# Altium footprint library FootPrintLib_1.PcbLib: 498 footprints (part 18 of 35)
Each footprint in its own frame and in the unit in brackets; x right, y up, seen from the top. Pads: shape width x height; smd on the part's side, far side on the other; paste and mask are expansions set on the pad; w line width, h text height; cw(c..) or ccw(c..) is an arc to the next point about the centre after c.
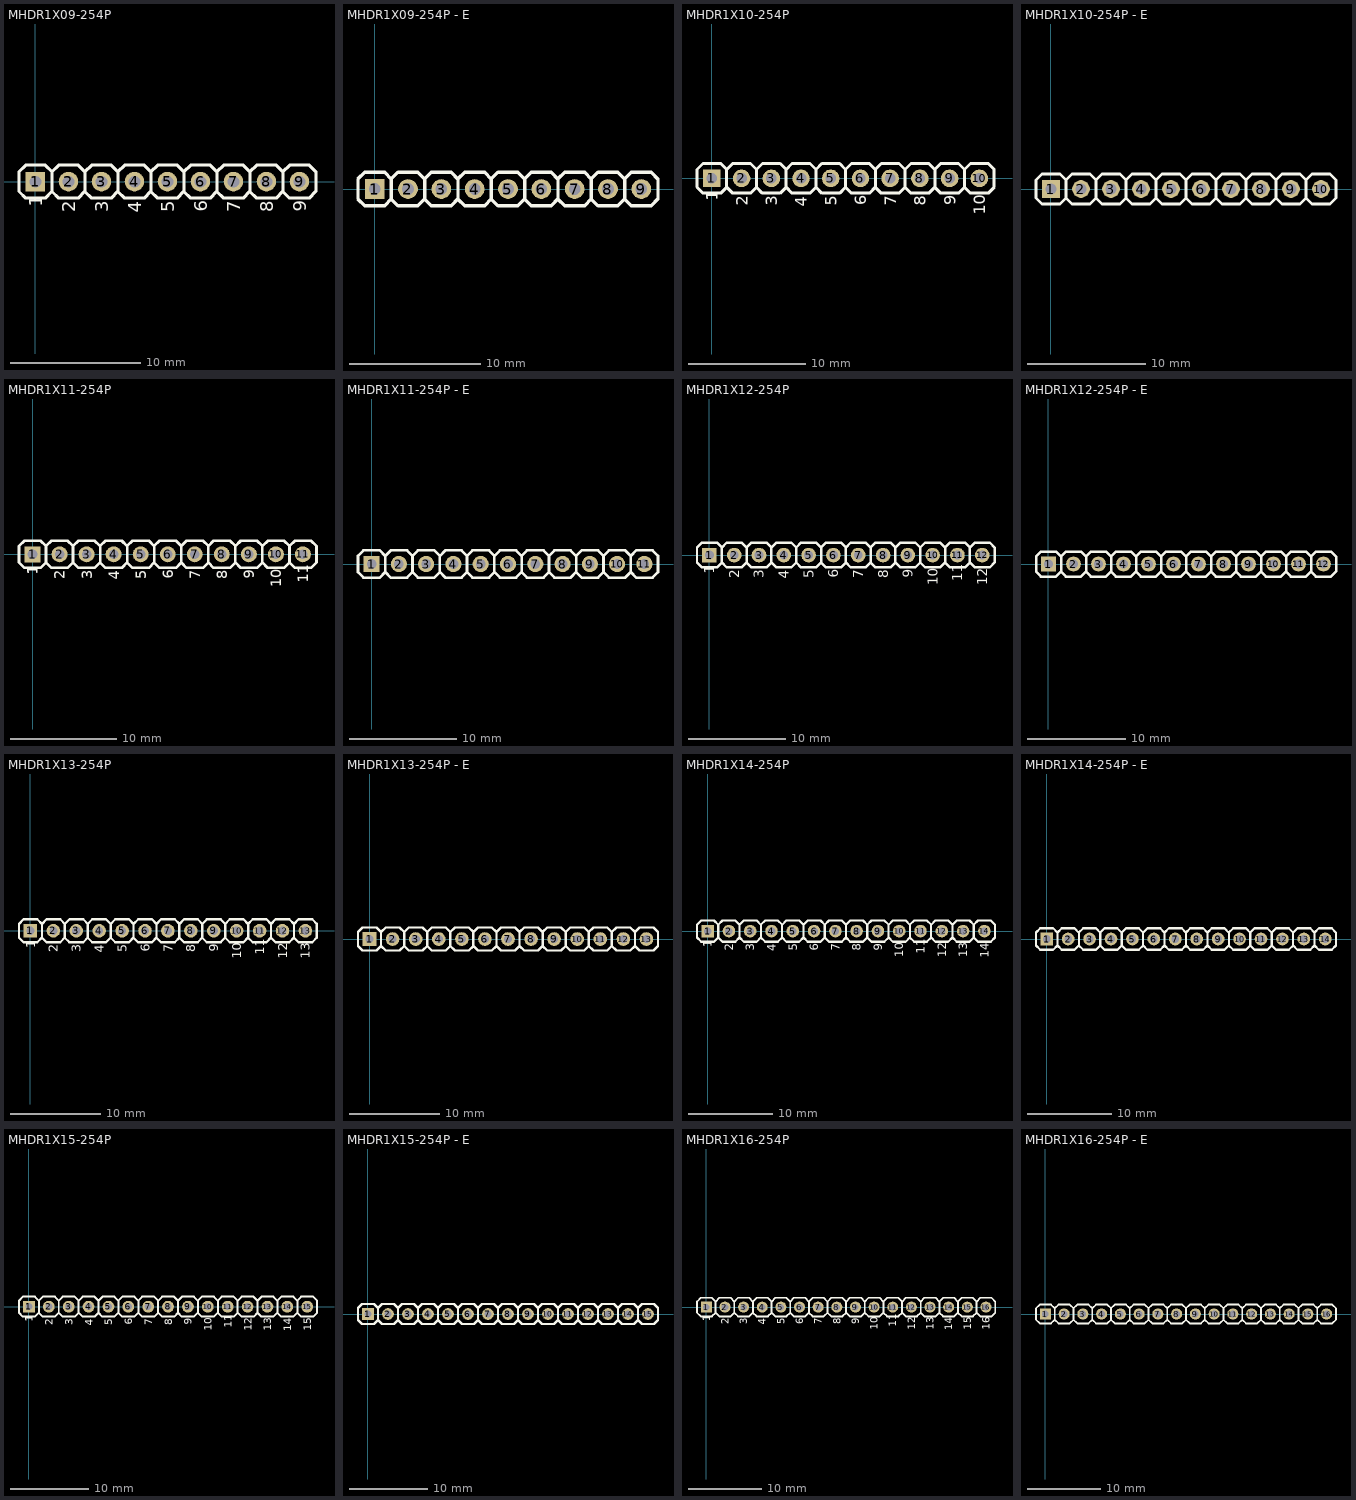
[diagram p17: the footprints below, top view; thin cyan lines are the x and y axes]

## MHDR1X09-254P [mm] "Male Header 1X09 with 2.54 mm Pitch"
height 8.4
pads (9):
  rect 1.5x1.5 hole 0.9: 1(0,0)
  round 1.5 hole 0.9: 2(2.54,0) 3(5.08,0) 4(7.62,0) 5(10.16,0) 6(12.7,0) 7(15.24,0) 8(17.78,0) 9(20.32,0)
Top Overlay:
  lines w0.254: 1.27,-0.762 1.777,-1.268 3.302,-1.268 3.81,-0.76 3.81,0.762 3.301,1.272 1.778,1.272 1.27,0.764 ; 3.81,-0.762 4.317,-1.268 5.842,-1.268 6.35,-0.76 6.35,0.762 5.841,1.272 4.318,1.272 3.81,0.764 ; 6.35,-0.762 6.857,-1.268 8.382,-1.268 8.89,-0.76 8.89,0.762 8.381,1.272 6.858,1.272 6.35,0.764 ; 8.89,-0.762 9.397,-1.268 10.922,-1.268 11.43,-0.76 11.43,0.762 10.921,1.272 9.398,1.272 8.89,0.764 ; 11.43,-0.762 11.937,-1.268 13.462,-1.268 13.97,-0.76 13.97,0.762 13.461,1.272 11.938,1.272 11.43,0.764 ; 13.97,-0.762 14.477,-1.268 16.002,-1.268 16.51,-0.76 16.51,0.762 16.001,1.272 14.478,1.272 13.97,0.764 ; 16.51,-0.762 17.017,-1.268 18.542,-1.268 19.05,-0.76 19.05,0.762 18.541,1.272 17.018,1.272 16.51,0.764 ; 19.05,-0.762 19.557,-1.268 21.082,-1.268 21.59,-0.76 21.59,0.762 21.081,1.272 19.558,1.272 19.05,0.764 ; -1.27,-0.762 -0.763,-1.268 0.762,-1.268 1.27,-0.76 1.27,0.762 0.761,1.272 -0.762,1.272 -1.27,0.764 -1.27,-0.762
  text "9" at 20.828,-2.317 h1
  text "8" at 18.288,-2.364 h1
  text "7" at 15.748,-2.364 h1
  text "6" at 13.208,-2.317 h1
  text "5" at 10.668,-2.364 h1
  text "4" at 8.128,-2.412 h1
  text "3" at 5.588,-2.364 h1
  text "2" at 3.048,-2.364 h1
  text "1" at 0.508,-1.936 h1
  text "1" at 0.508,-1.936 h1
3D body "PIN.STEP": height 8.43, standoff -2.49, extent -1.27,-1.27 1.27,1.27
3D body "PIN_mid.STEP": height 8.43, standoff -2.49, extent 1.27,-1.27 3.81,1.27
3D body "PIN_mid.STEP": height 8.43, standoff -2.49, extent 3.81,-1.27 6.35,1.27
3D body "PIN_mid.STEP": height 8.43, standoff -2.49, extent 6.35,-1.27 8.89,1.27
3D body "PIN_mid.STEP": height 8.43, standoff -2.49, extent 8.89,-1.27 11.43,1.27
3D body "PIN_mid.STEP": height 8.43, standoff -2.49, extent 11.43,-1.27 13.97,1.27
3D body "PIN_mid.STEP": height 8.43, standoff -2.49, extent 13.97,-1.27 16.51,1.27
3D body "PIN_mid.STEP": height 8.43, standoff -2.49, extent 16.51,-1.27 19.05,1.27
3D body "PIN.STEP": height 8.43, standoff -2.49, extent 19.05,-1.27 21.59,1.27

## MHDR1X09-254P - E [mm] "Male Header 1X09 with 2.54 mm Pitch"
height 8.4
pads (9):
  rect 1.5x1.5 hole 0.9: 1(0,0)
  round 1.5 hole 0.9: 2(2.54,0) 3(5.08,0) 4(7.62,0) 5(10.16,0) 6(12.7,0) 7(15.24,0) 8(17.78,0) 9(20.32,0)
Top Overlay:
  lines w0.254: 1.27,-0.762 1.777,-1.268 3.302,-1.268 3.81,-0.76 3.81,0.762 3.301,1.272 1.778,1.272 1.27,0.764 ; 3.81,-0.762 4.317,-1.268 5.842,-1.268 6.35,-0.76 6.35,0.762 5.841,1.272 4.318,1.272 3.81,0.764 ; 6.35,-0.762 6.857,-1.268 8.382,-1.268 8.89,-0.76 8.89,0.762 8.381,1.272 6.858,1.272 6.35,0.764 ; 8.89,-0.762 9.397,-1.268 10.922,-1.268 11.43,-0.76 11.43,0.762 10.921,1.272 9.398,1.272 8.89,0.764 ; 11.43,-0.762 11.937,-1.268 13.462,-1.268 13.97,-0.76 13.97,0.762 13.461,1.272 11.938,1.272 11.43,0.764 ; 13.97,-0.762 14.477,-1.268 16.002,-1.268 16.51,-0.76 16.51,0.762 16.001,1.272 14.478,1.272 13.97,0.764 ; 16.51,-0.762 17.017,-1.268 18.542,-1.268 19.05,-0.76 19.05,0.762 18.541,1.272 17.018,1.272 16.51,0.764 ; 19.05,-0.762 19.557,-1.268 21.082,-1.268 21.59,-0.76 21.59,0.762 21.081,1.272 19.558,1.272 19.05,0.764 ; -1.27,-0.762 -1.27,0.764 -0.762,1.272 0.761,1.272 1.27,0.762 1.27,-0.76 0.762,-1.268 -0.763,-1.268 -1.27,-0.762
3D body "PIN.STEP": height 8.43, standoff -2.49, extent 19.05,-1.27 21.59,1.27
3D body "PIN_mid.STEP": height 8.43, standoff -2.49, extent 16.51,-1.27 19.05,1.27
3D body "PIN_mid.STEP": height 8.43, standoff -2.49, extent 13.97,-1.27 16.51,1.27
3D body "PIN_mid.STEP": height 8.43, standoff -2.49, extent 11.43,-1.27 13.97,1.27
3D body "PIN_mid.STEP": height 8.43, standoff -2.49, extent 8.89,-1.27 11.43,1.27
3D body "PIN_mid.STEP": height 8.43, standoff -2.49, extent 6.35,-1.27 8.89,1.27
3D body "PIN_mid.STEP": height 8.43, standoff -2.49, extent 3.81,-1.27 6.35,1.27
3D body "PIN_mid.STEP": height 8.43, standoff -2.49, extent 1.27,-1.27 3.81,1.27
3D body "PIN.STEP": height 8.43, standoff -2.49, extent -1.27,-1.27 1.27,1.27

## MHDR1X10-254P [mm] "Male Header 1X10 with 2.54 mm Pitch"
height 8.4
pads (10):
  rect 1.5x1.5 hole 0.9: 1(0,0)
  round 1.5 hole 0.9: 2(2.54,0) 3(5.08,0) 4(7.62,0) 5(10.16,0) 6(12.7,0) 7(15.24,0) 8(17.78,0) 9(20.32,0) 10(22.86,0)
Top Overlay:
  lines w0.254: 1.27,-0.762 1.777,-1.268 3.302,-1.268 3.81,-0.76 3.81,0.762 3.301,1.272 1.778,1.272 1.27,0.764 ; 3.81,-0.762 4.317,-1.268 5.842,-1.268 6.35,-0.76 6.35,0.762 5.841,1.272 4.318,1.272 3.81,0.764 ; 6.35,-0.762 6.857,-1.268 8.382,-1.268 8.89,-0.76 8.89,0.762 8.381,1.272 6.858,1.272 6.35,0.764 ; 8.89,-0.762 9.397,-1.268 10.922,-1.268 11.43,-0.76 11.43,0.762 10.921,1.272 9.398,1.272 8.89,0.764 ; 11.43,-0.762 11.937,-1.268 13.462,-1.268 13.97,-0.76 13.97,0.762 13.461,1.272 11.938,1.272 11.43,0.764 ; 13.97,-0.762 14.477,-1.268 16.002,-1.268 16.51,-0.76 16.51,0.762 16.001,1.272 14.478,1.272 13.97,0.764 ; 16.51,-0.762 17.017,-1.268 18.542,-1.268 19.05,-0.76 19.05,0.762 18.541,1.272 17.018,1.272 16.51,0.764 ; 19.05,-0.762 19.557,-1.268 21.082,-1.268 21.59,-0.76 21.59,0.762 21.081,1.272 19.558,1.272 19.05,0.764 ; 21.59,-0.762 22.097,-1.268 23.622,-1.268 24.13,-0.76 24.13,0.762 23.621,1.272 22.098,1.272 21.59,0.764 ; -1.27,-0.762 -1.27,0.764 -0.762,1.272 0.761,1.272 1.27,0.762 1.27,-0.76 0.762,-1.268 -0.763,-1.268 -1.27,-0.762
  text "10" at 23.368,-3.097 h1
  text "9" at 20.828,-2.317 h1
  text "8" at 18.288,-2.364 h1
  text "7" at 15.748,-2.364 h1
  text "6" at 13.208,-2.317 h1
  text "5" at 10.668,-2.364 h1
  text "4" at 8.128,-2.412 h1
  text "3" at 5.588,-2.364 h1
  text "2" at 3.048,-2.364 h1
  text "1" at 0.508,-1.936 h1
  text "1" at 0.508,-1.936 h1
3D body "PIN.STEP": height 8.43, standoff -2.49, extent 21.59,-1.27 24.13,1.27
3D body "PIN_mid.STEP": height 8.43, standoff -2.49, extent 19.05,-1.27 21.59,1.27
3D body "PIN_mid.STEP": height 8.43, standoff -2.49, extent 16.51,-1.27 19.05,1.27
3D body "PIN_mid.STEP": height 8.43, standoff -2.49, extent 13.97,-1.27 16.51,1.27
3D body "PIN_mid.STEP": height 8.43, standoff -2.49, extent 11.43,-1.27 13.97,1.27
3D body "PIN_mid.STEP": height 8.43, standoff -2.49, extent 8.89,-1.27 11.43,1.27
3D body "PIN_mid.STEP": height 8.43, standoff -2.49, extent 6.35,-1.27 8.89,1.27
3D body "PIN_mid.STEP": height 8.43, standoff -2.49, extent 3.81,-1.27 6.35,1.27
3D body "PIN_mid.STEP": height 8.43, standoff -2.49, extent 1.27,-1.27 3.81,1.27
3D body "PIN.STEP": height 8.43, standoff -2.49, extent -1.27,-1.27 1.27,1.27

## MHDR1X10-254P - E [mm] "Male Header 1X10 with 2.54 mm Pitch"
height 8.4
pads (10):
  rect 1.5x1.5 hole 0.9: 1(0,0)
  round 1.5 hole 0.9: 2(2.54,0) 3(5.08,0) 4(7.62,0) 5(10.16,0) 6(12.7,0) 7(15.24,0) 8(17.78,0) 9(20.32,0) 10(22.86,0)
Top Overlay:
  lines w0.254: 1.27,-0.762 1.777,-1.268 3.302,-1.268 3.81,-0.76 3.81,0.762 3.301,1.272 1.778,1.272 1.27,0.764 ; 3.81,-0.762 4.317,-1.268 5.842,-1.268 6.35,-0.76 6.35,0.762 5.841,1.272 4.318,1.272 3.81,0.764 ; 6.35,-0.762 6.857,-1.268 8.382,-1.268 8.89,-0.76 8.89,0.762 8.381,1.272 6.858,1.272 6.35,0.764 ; 8.89,-0.762 9.397,-1.268 10.922,-1.268 11.43,-0.76 11.43,0.762 10.921,1.272 9.398,1.272 8.89,0.764 ; 11.43,-0.762 11.937,-1.268 13.462,-1.268 13.97,-0.76 13.97,0.762 13.461,1.272 11.938,1.272 11.43,0.764 ; 13.97,-0.762 14.477,-1.268 16.002,-1.268 16.51,-0.76 16.51,0.762 16.001,1.272 14.478,1.272 13.97,0.764 ; 16.51,-0.762 17.017,-1.268 18.542,-1.268 19.05,-0.76 19.05,0.762 18.541,1.272 17.018,1.272 16.51,0.764 ; 19.05,-0.762 19.557,-1.268 21.082,-1.268 21.59,-0.76 21.59,0.762 21.081,1.272 19.558,1.272 19.05,0.764 ; 21.59,-0.762 22.097,-1.268 23.622,-1.268 24.13,-0.76 24.13,0.762 23.621,1.272 22.098,1.272 21.59,0.764 ; -1.27,-0.762 -1.27,0.764 -0.762,1.272 0.761,1.272 1.27,0.762 1.27,-0.76 0.762,-1.268 -0.763,-1.268 -1.27,-0.762
3D body "PIN.STEP": height 8.43, standoff -2.49, extent -1.27,-1.27 1.27,1.27
3D body "PIN_mid.STEP": height 8.43, standoff -2.49, extent 1.27,-1.27 3.81,1.27
3D body "PIN_mid.STEP": height 8.43, standoff -2.49, extent 3.81,-1.27 6.35,1.27
3D body "PIN_mid.STEP": height 8.43, standoff -2.49, extent 6.35,-1.27 8.89,1.27
3D body "PIN_mid.STEP": height 8.43, standoff -2.49, extent 8.89,-1.27 11.43,1.27
3D body "PIN_mid.STEP": height 8.43, standoff -2.49, extent 11.43,-1.27 13.97,1.27
3D body "PIN_mid.STEP": height 8.43, standoff -2.49, extent 13.97,-1.27 16.51,1.27
3D body "PIN_mid.STEP": height 8.43, standoff -2.49, extent 16.51,-1.27 19.05,1.27
3D body "PIN_mid.STEP": height 8.43, standoff -2.49, extent 19.05,-1.27 21.59,1.27
3D body "PIN.STEP": height 8.43, standoff -2.49, extent 21.59,-1.27 24.13,1.27

## MHDR1X11-254P [mm] "Male Header 1X11 with 2.54 mm Pitch"
height 8.4
pads (11):
  rect 1.5x1.5 hole 0.9: 1(0,0)
  round 1.5 hole 0.9: 2(2.54,0) 3(5.08,0) 4(7.62,0) 5(10.16,0) 6(12.7,0) 7(15.24,0) 8(17.78,0) 9(20.32,0) 10(22.86,0) 11(25.4,0)
Top Overlay:
  lines w0.254: 1.27,-0.762 1.777,-1.268 3.302,-1.268 3.81,-0.76 3.81,0.762 3.301,1.272 1.778,1.272 1.27,0.764 ; 3.81,-0.762 4.317,-1.268 5.842,-1.268 6.35,-0.76 6.35,0.762 5.841,1.272 4.318,1.272 3.81,0.764 ; 6.35,-0.762 6.857,-1.268 8.382,-1.268 8.89,-0.76 8.89,0.762 8.381,1.272 6.858,1.272 6.35,0.764 ; 8.89,-0.762 9.397,-1.268 10.922,-1.268 11.43,-0.76 11.43,0.762 10.921,1.272 9.398,1.272 8.89,0.764 ; 11.43,-0.762 11.937,-1.268 13.462,-1.268 13.97,-0.76 13.97,0.762 13.461,1.272 11.938,1.272 11.43,0.764 ; 13.97,-0.762 14.477,-1.268 16.002,-1.268 16.51,-0.76 16.51,0.762 16.001,1.272 14.478,1.272 13.97,0.764 ; 16.51,-0.762 17.017,-1.268 18.542,-1.268 19.05,-0.76 19.05,0.762 18.541,1.272 17.018,1.272 16.51,0.764 ; 19.05,-0.762 19.557,-1.268 21.082,-1.268 21.59,-0.76 21.59,0.762 21.081,1.272 19.558,1.272 19.05,0.764 ; 21.59,-0.762 22.097,-1.268 23.622,-1.268 24.13,-0.76 24.13,0.762 23.621,1.272 22.098,1.272 21.59,0.764 ; 24.13,-0.762 24.637,-1.268 26.162,-1.268 26.67,-0.76 26.67,0.762 26.161,1.272 24.638,1.272 24.13,0.764 ; -1.27,-0.762 -1.27,0.764 -0.762,1.272 0.761,1.272 1.27,0.762 1.27,-0.76 0.762,-1.268 -0.763,-1.268 -1.27,-0.762
  text "1" at 0.508,-1.936 h1
  text "1" at 0.508,-1.936 h1
  text "2" at 3.048,-2.364 h1
  text "3" at 5.588,-2.364 h1
  text "4" at 8.128,-2.412 h1
  text "5" at 10.668,-2.364 h1
  text "6" at 13.208,-2.317 h1
  text "7" at 15.748,-2.364 h1
  text "8" at 18.288,-2.364 h1
  text "9" at 20.828,-2.317 h1
  text "10" at 23.368,-3.097 h1
  text "11" at 25.908,-2.669 h1
3D body "PIN.STEP": height 8.43, standoff -2.49, extent -1.27,-1.27 1.27,1.27
3D body "PIN_mid.STEP": height 8.43, standoff -2.49, extent 1.27,-1.27 3.81,1.27
3D body "PIN_mid.STEP": height 8.43, standoff -2.49, extent 3.81,-1.27 6.35,1.27
3D body "PIN_mid.STEP": height 8.43, standoff -2.49, extent 6.35,-1.27 8.89,1.27
3D body "PIN_mid.STEP": height 8.43, standoff -2.49, extent 8.89,-1.27 11.43,1.27
3D body "PIN_mid.STEP": height 8.43, standoff -2.49, extent 11.43,-1.27 13.97,1.27
3D body "PIN_mid.STEP": height 8.43, standoff -2.49, extent 13.97,-1.27 16.51,1.27
3D body "PIN_mid.STEP": height 8.43, standoff -2.49, extent 16.51,-1.27 19.05,1.27
3D body "PIN_mid.STEP": height 8.43, standoff -2.49, extent 19.05,-1.27 21.59,1.27
3D body "PIN_mid.STEP": height 8.43, standoff -2.49, extent 21.59,-1.27 24.13,1.27
3D body "PIN.STEP": height 8.43, standoff -2.49, extent 24.13,-1.27 26.67,1.27

## MHDR1X11-254P - E [mm] "Male Header 1X11 with 2.54 mm Pitch"
height 8.4
pads (11):
  rect 1.5x1.5 hole 0.9: 1(0,0)
  round 1.5 hole 0.9: 2(2.54,0) 3(5.08,0) 4(7.62,0) 5(10.16,0) 6(12.7,0) 7(15.24,0) 8(17.78,0) 9(20.32,0) 10(22.86,0) 11(25.4,0)
Top Overlay:
  lines w0.254: 1.27,-0.762 1.777,-1.268 3.302,-1.268 3.81,-0.76 3.81,0.762 3.301,1.272 1.778,1.272 1.27,0.764 ; 3.81,-0.762 4.317,-1.268 5.842,-1.268 6.35,-0.76 6.35,0.762 5.841,1.272 4.318,1.272 3.81,0.764 ; 6.35,-0.762 6.857,-1.268 8.382,-1.268 8.89,-0.76 8.89,0.762 8.381,1.272 6.858,1.272 6.35,0.764 ; 8.89,-0.762 9.397,-1.268 10.922,-1.268 11.43,-0.76 11.43,0.762 10.921,1.272 9.398,1.272 8.89,0.764 ; 11.43,-0.762 11.937,-1.268 13.462,-1.268 13.97,-0.76 13.97,0.762 13.461,1.272 11.938,1.272 11.43,0.764 ; 13.97,-0.762 14.477,-1.268 16.002,-1.268 16.51,-0.76 16.51,0.762 16.001,1.272 14.478,1.272 13.97,0.764 ; 16.51,-0.762 17.017,-1.268 18.542,-1.268 19.05,-0.76 19.05,0.762 18.541,1.272 17.018,1.272 16.51,0.764 ; 19.05,-0.762 19.557,-1.268 21.082,-1.268 21.59,-0.76 21.59,0.762 21.081,1.272 19.558,1.272 19.05,0.764 ; 21.59,-0.762 22.097,-1.268 23.622,-1.268 24.13,-0.76 24.13,0.762 23.621,1.272 22.098,1.272 21.59,0.764 ; 24.13,-0.762 24.637,-1.268 26.162,-1.268 26.67,-0.76 26.67,0.762 26.161,1.272 24.638,1.272 24.13,0.764 ; -1.27,-0.762 -0.763,-1.268 0.762,-1.268 1.27,-0.76 1.27,0.762 0.761,1.272 -0.762,1.272 -1.27,0.764 -1.27,-0.762
3D body "PIN.STEP": height 8.43, standoff -2.49, extent 24.13,-1.27 26.67,1.27
3D body "PIN_mid.STEP": height 8.43, standoff -2.49, extent 21.59,-1.27 24.13,1.27
3D body "PIN_mid.STEP": height 8.43, standoff -2.49, extent 19.05,-1.27 21.59,1.27
3D body "PIN_mid.STEP": height 8.43, standoff -2.49, extent 16.51,-1.27 19.05,1.27
3D body "PIN_mid.STEP": height 8.43, standoff -2.49, extent 13.97,-1.27 16.51,1.27
3D body "PIN_mid.STEP": height 8.43, standoff -2.49, extent 11.43,-1.27 13.97,1.27
3D body "PIN_mid.STEP": height 8.43, standoff -2.49, extent 8.89,-1.27 11.43,1.27
3D body "PIN_mid.STEP": height 8.43, standoff -2.49, extent 6.35,-1.27 8.89,1.27
3D body "PIN_mid.STEP": height 8.43, standoff -2.49, extent 3.81,-1.27 6.35,1.27
3D body "PIN_mid.STEP": height 8.43, standoff -2.49, extent 1.27,-1.27 3.81,1.27
3D body "PIN.STEP": height 8.43, standoff -2.49, extent -1.27,-1.27 1.27,1.27

## MHDR1X12-254P [mm] "Male Header 1X12 with 2.54 mm Pitch"
height 8.4
pads (12):
  rect 1.5x1.5 hole 0.9: 1(0,0)
  round 1.5 hole 0.9: 2(2.54,0) 3(5.08,0) 4(7.62,0) 5(10.16,0) 6(12.7,0) 7(15.24,0) 8(17.78,0) 9(20.32,0) 10(22.86,0) 11(25.4,0) 12(27.94,0)
Top Overlay:
  lines w0.254: 1.27,-0.762 1.777,-1.268 3.302,-1.268 3.81,-0.76 3.81,0.762 3.301,1.272 1.778,1.272 1.27,0.764 ; 3.81,-0.762 4.317,-1.268 5.842,-1.268 6.35,-0.76 6.35,0.762 5.841,1.272 4.318,1.272 3.81,0.764 ; 6.35,-0.762 6.857,-1.268 8.382,-1.268 8.89,-0.76 8.89,0.762 8.381,1.272 6.858,1.272 6.35,0.764 ; 8.89,-0.762 9.397,-1.268 10.922,-1.268 11.43,-0.76 11.43,0.762 10.921,1.272 9.398,1.272 8.89,0.764 ; 11.43,-0.762 11.937,-1.268 13.462,-1.268 13.97,-0.76 13.97,0.762 13.461,1.272 11.938,1.272 11.43,0.764 ; 13.97,-0.762 14.477,-1.268 16.002,-1.268 16.51,-0.76 16.51,0.762 16.001,1.272 14.478,1.272 13.97,0.764 ; 16.51,-0.762 17.017,-1.268 18.542,-1.268 19.05,-0.76 19.05,0.762 18.541,1.272 17.018,1.272 16.51,0.764 ; 19.05,-0.762 19.557,-1.268 21.082,-1.268 21.59,-0.76 21.59,0.762 21.081,1.272 19.558,1.272 19.05,0.764 ; 21.59,-0.762 22.097,-1.268 23.622,-1.268 24.13,-0.76 24.13,0.762 23.621,1.272 22.098,1.272 21.59,0.764 ; 24.13,-0.762 24.637,-1.268 26.162,-1.268 26.67,-0.76 26.67,0.762 26.161,1.272 24.638,1.272 24.13,0.764 ; 26.67,-0.762 27.177,-1.268 28.702,-1.268 29.21,-0.76 29.21,0.762 28.701,1.272 27.178,1.272 26.67,0.764 ; -1.27,-0.762 -0.763,-1.268 0.762,-1.268 1.27,-0.76 1.27,0.762 0.761,1.272 -0.762,1.272 -1.27,0.764 -1.27,-0.762
  text "12" at 28.448,-3.097 h1
  text "11" at 25.908,-2.669 h1
  text "10" at 23.368,-3.097 h1
  text "9" at 20.828,-2.317 h1
  text "8" at 18.288,-2.364 h1
  text "7" at 15.748,-2.364 h1
  text "6" at 13.208,-2.317 h1
  text "5" at 10.668,-2.364 h1
  text "4" at 8.128,-2.412 h1
  text "3" at 5.588,-2.364 h1
  text "2" at 3.048,-2.364 h1
  text "1" at 0.508,-1.936 h1
  text "1" at 0.508,-1.936 h1
3D body "PIN.STEP": height 8.43, standoff -2.49, extent 26.67,-1.27 29.21,1.27
3D body "PIN_mid.STEP": height 8.43, standoff -2.49, extent 24.13,-1.27 26.67,1.27
3D body "PIN_mid.STEP": height 8.43, standoff -2.49, extent 21.59,-1.27 24.13,1.27
3D body "PIN_mid.STEP": height 8.43, standoff -2.49, extent 19.05,-1.27 21.59,1.27
3D body "PIN_mid.STEP": height 8.43, standoff -2.49, extent 16.51,-1.27 19.05,1.27
3D body "PIN_mid.STEP": height 8.43, standoff -2.49, extent 13.97,-1.27 16.51,1.27
3D body "PIN_mid.STEP": height 8.43, standoff -2.49, extent 11.43,-1.27 13.97,1.27
3D body "PIN_mid.STEP": height 8.43, standoff -2.49, extent 8.89,-1.27 11.43,1.27
3D body "PIN_mid.STEP": height 8.43, standoff -2.49, extent 6.35,-1.27 8.89,1.27
3D body "PIN_mid.STEP": height 8.43, standoff -2.49, extent 3.81,-1.27 6.35,1.27
3D body "PIN_mid.STEP": height 8.43, standoff -2.49, extent 1.27,-1.27 3.81,1.27
3D body "PIN.STEP": height 8.43, standoff -2.49, extent -1.27,-1.27 1.27,1.27

## MHDR1X12-254P - E [mm] "Male Header 1X12 with 2.54 mm Pitch"
height 8.4
pads (12):
  rect 1.5x1.5 hole 0.9: 1(0,0)
  round 1.5 hole 0.9: 2(2.54,0) 3(5.08,0) 4(7.62,0) 5(10.16,0) 6(12.7,0) 7(15.24,0) 8(17.78,0) 9(20.32,0) 10(22.86,0) 11(25.4,0) 12(27.94,0)
Top Overlay:
  lines w0.254: 1.27,-0.762 1.777,-1.268 3.302,-1.268 3.81,-0.76 3.81,0.762 3.301,1.272 1.778,1.272 1.27,0.764 ; 3.81,-0.762 4.317,-1.268 5.842,-1.268 6.35,-0.76 6.35,0.762 5.841,1.272 4.318,1.272 3.81,0.764 ; 6.35,-0.762 6.857,-1.268 8.382,-1.268 8.89,-0.76 8.89,0.762 8.381,1.272 6.858,1.272 6.35,0.764 ; 8.89,-0.762 9.397,-1.268 10.922,-1.268 11.43,-0.76 11.43,0.762 10.921,1.272 9.398,1.272 8.89,0.764 ; 11.43,-0.762 11.937,-1.268 13.462,-1.268 13.97,-0.76 13.97,0.762 13.461,1.272 11.938,1.272 11.43,0.764 ; 13.97,-0.762 14.477,-1.268 16.002,-1.268 16.51,-0.76 16.51,0.762 16.001,1.272 14.478,1.272 13.97,0.764 ; 16.51,-0.762 17.017,-1.268 18.542,-1.268 19.05,-0.76 19.05,0.762 18.541,1.272 17.018,1.272 16.51,0.764 ; 19.05,-0.762 19.557,-1.268 21.082,-1.268 21.59,-0.76 21.59,0.762 21.081,1.272 19.558,1.272 19.05,0.764 ; 21.59,-0.762 22.097,-1.268 23.622,-1.268 24.13,-0.76 24.13,0.762 23.621,1.272 22.098,1.272 21.59,0.764 ; 24.13,-0.762 24.637,-1.268 26.162,-1.268 26.67,-0.76 26.67,0.762 26.161,1.272 24.638,1.272 24.13,0.764 ; 26.67,-0.762 27.177,-1.268 28.702,-1.268 29.21,-0.76 29.21,0.762 28.701,1.272 27.178,1.272 26.67,0.764 ; -1.27,-0.762 -0.763,-1.268 0.762,-1.268 1.27,-0.76 1.27,0.762 0.761,1.272 -0.762,1.272 -1.27,0.764 -1.27,-0.762
3D body "PIN.STEP": height 8.43, standoff -2.49, extent -1.27,-1.27 1.27,1.27
3D body "PIN_mid.STEP": height 8.43, standoff -2.49, extent 1.27,-1.27 3.81,1.27
3D body "PIN_mid.STEP": height 8.43, standoff -2.49, extent 3.81,-1.27 6.35,1.27
3D body "PIN_mid.STEP": height 8.43, standoff -2.49, extent 6.35,-1.27 8.89,1.27
3D body "PIN_mid.STEP": height 8.43, standoff -2.49, extent 8.89,-1.27 11.43,1.27
3D body "PIN_mid.STEP": height 8.43, standoff -2.49, extent 11.43,-1.27 13.97,1.27
3D body "PIN_mid.STEP": height 8.43, standoff -2.49, extent 13.97,-1.27 16.51,1.27
3D body "PIN_mid.STEP": height 8.43, standoff -2.49, extent 16.51,-1.27 19.05,1.27
3D body "PIN_mid.STEP": height 8.43, standoff -2.49, extent 19.05,-1.27 21.59,1.27
3D body "PIN_mid.STEP": height 8.43, standoff -2.49, extent 21.59,-1.27 24.13,1.27
3D body "PIN_mid.STEP": height 8.43, standoff -2.49, extent 24.13,-1.27 26.67,1.27
3D body "PIN.STEP": height 8.43, standoff -2.49, extent 26.67,-1.27 29.21,1.27

## MHDR1X13-254P [mm] "Male Header 1X13 with 2.54 mm Pitch"
height 8.4
pads (13):
  rect 1.5x1.5 hole 0.9: 1(0,0)
  round 1.5 hole 0.9: 2(2.54,0) 3(5.08,0) 4(7.62,0) 5(10.16,0) 6(12.7,0) 7(15.24,0) 8(17.78,0) 9(20.32,0) 10(22.86,0) 11(25.4,0) 12(27.94,0) 13(30.48,0)
Top Overlay:
  lines w0.254: 1.27,-0.762 1.777,-1.268 3.302,-1.268 3.81,-0.76 3.81,0.762 3.301,1.272 1.778,1.272 1.27,0.764 ; 3.81,-0.762 4.317,-1.268 5.842,-1.268 6.35,-0.76 6.35,0.762 5.841,1.272 4.318,1.272 3.81,0.764 ; 6.35,-0.762 6.857,-1.268 8.382,-1.268 8.89,-0.76 8.89,0.762 8.381,1.272 6.858,1.272 6.35,0.764 ; 8.89,-0.762 9.397,-1.268 10.922,-1.268 11.43,-0.76 11.43,0.762 10.921,1.272 9.398,1.272 8.89,0.764 ; 11.43,-0.762 11.937,-1.268 13.462,-1.268 13.97,-0.76 13.97,0.762 13.461,1.272 11.938,1.272 11.43,0.764 ; 13.97,-0.762 14.477,-1.268 16.002,-1.268 16.51,-0.76 16.51,0.762 16.001,1.272 14.478,1.272 13.97,0.764 ; 16.51,-0.762 17.017,-1.268 18.542,-1.268 19.05,-0.76 19.05,0.762 18.541,1.272 17.018,1.272 16.51,0.764 ; 19.05,-0.762 19.557,-1.268 21.082,-1.268 21.59,-0.76 21.59,0.762 21.081,1.272 19.558,1.272 19.05,0.764 ; 21.59,-0.762 22.097,-1.268 23.622,-1.268 24.13,-0.76 24.13,0.762 23.621,1.272 22.098,1.272 21.59,0.764 ; 24.13,-0.762 24.637,-1.268 26.162,-1.268 26.67,-0.76 26.67,0.762 26.161,1.272 24.638,1.272 24.13,0.764 ; 26.67,-0.762 27.177,-1.268 28.702,-1.268 29.21,-0.76 29.21,0.762 28.701,1.272 27.178,1.272 26.67,0.764 ; 29.21,-0.762 29.717,-1.268 31.242,-1.268 31.75,-0.76 31.75,0.762 31.241,1.272 29.718,1.272 29.21,0.764 ; -1.27,-0.762 -0.763,-1.268 0.762,-1.268 1.27,-0.76 1.27,0.762 0.761,1.272 -0.762,1.272 -1.27,0.764 -1.27,-0.762
  text "13" at 30.988,-3.097 h1
  text "12" at 28.448,-3.097 h1
  text "11" at 25.908,-2.669 h1
  text "10" at 23.368,-3.097 h1
  text "9" at 20.828,-2.317 h1
  text "8" at 18.288,-2.364 h1
  text "7" at 15.748,-2.364 h1
  text "6" at 13.208,-2.317 h1
  text "5" at 10.668,-2.364 h1
  text "4" at 8.128,-2.412 h1
  text "3" at 5.588,-2.364 h1
  text "2" at 3.048,-2.364 h1
  text "1" at 0.508,-1.936 h1
  text "1" at 0.508,-1.936 h1
3D body "PIN.STEP": height 8.43, standoff -2.49, extent -1.27,-1.27 1.27,1.27
3D body "PIN_mid.STEP": height 8.43, standoff -2.49, extent 1.27,-1.27 3.81,1.27
3D body "PIN_mid.STEP": height 8.43, standoff -2.49, extent 3.81,-1.27 6.35,1.27
3D body "PIN_mid.STEP": height 8.43, standoff -2.49, extent 6.35,-1.27 8.89,1.27
3D body "PIN_mid.STEP": height 8.43, standoff -2.49, extent 8.89,-1.27 11.43,1.27
3D body "PIN_mid.STEP": height 8.43, standoff -2.49, extent 11.43,-1.27 13.97,1.27
3D body "PIN_mid.STEP": height 8.43, standoff -2.49, extent 13.97,-1.27 16.51,1.27
3D body "PIN_mid.STEP": height 8.43, standoff -2.49, extent 16.51,-1.27 19.05,1.27
3D body "PIN_mid.STEP": height 8.43, standoff -2.49, extent 19.05,-1.27 21.59,1.27
3D body "PIN_mid.STEP": height 8.43, standoff -2.49, extent 21.59,-1.27 24.13,1.27
3D body "PIN_mid.STEP": height 8.43, standoff -2.49, extent 24.13,-1.27 26.67,1.27
3D body "PIN_mid.STEP": height 8.43, standoff -2.49, extent 26.67,-1.27 29.21,1.27
3D body "PIN.STEP": height 8.43, standoff -2.49, extent 29.21,-1.27 31.75,1.27

## MHDR1X13-254P - E [mm] "Male Header 1X13 with 2.54 mm Pitch"
height 8.4
pads (13):
  rect 1.5x1.5 hole 0.9: 1(0,0)
  round 1.5 hole 0.9: 2(2.54,0) 3(5.08,0) 4(7.62,0) 5(10.16,0) 6(12.7,0) 7(15.24,0) 8(17.78,0) 9(20.32,0) 10(22.86,0) 11(25.4,0) 12(27.94,0) 13(30.48,0)
Top Overlay:
  lines w0.254: 1.27,-0.762 1.777,-1.268 3.302,-1.268 3.81,-0.76 3.81,0.762 3.301,1.272 1.778,1.272 1.27,0.764 ; 3.81,-0.762 4.317,-1.268 5.842,-1.268 6.35,-0.76 6.35,0.762 5.841,1.272 4.318,1.272 3.81,0.764 ; 6.35,-0.762 6.857,-1.268 8.382,-1.268 8.89,-0.76 8.89,0.762 8.381,1.272 6.858,1.272 6.35,0.764 ; 8.89,-0.762 9.397,-1.268 10.922,-1.268 11.43,-0.76 11.43,0.762 10.921,1.272 9.398,1.272 8.89,0.764 ; 11.43,-0.762 11.937,-1.268 13.462,-1.268 13.97,-0.76 13.97,0.762 13.461,1.272 11.938,1.272 11.43,0.764 ; 13.97,-0.762 14.477,-1.268 16.002,-1.268 16.51,-0.76 16.51,0.762 16.001,1.272 14.478,1.272 13.97,0.764 ; 16.51,-0.762 17.017,-1.268 18.542,-1.268 19.05,-0.76 19.05,0.762 18.541,1.272 17.018,1.272 16.51,0.764 ; 19.05,-0.762 19.557,-1.268 21.082,-1.268 21.59,-0.76 21.59,0.762 21.081,1.272 19.558,1.272 19.05,0.764 ; 21.59,-0.762 22.097,-1.268 23.622,-1.268 24.13,-0.76 24.13,0.762 23.621,1.272 22.098,1.272 21.59,0.764 ; 24.13,-0.762 24.637,-1.268 26.162,-1.268 26.67,-0.76 26.67,0.762 26.161,1.272 24.638,1.272 24.13,0.764 ; 26.67,-0.762 27.177,-1.268 28.702,-1.268 29.21,-0.76 29.21,0.762 28.701,1.272 27.178,1.272 26.67,0.764 ; 29.21,-0.762 29.717,-1.268 31.242,-1.268 31.75,-0.76 31.75,0.762 31.241,1.272 29.718,1.272 29.21,0.764 ; -1.27,-0.762 -1.27,0.764 -0.762,1.272 0.761,1.272 1.27,0.762 1.27,-0.76 0.762,-1.268 -0.763,-1.268 -1.27,-0.762
3D body "PIN.STEP": height 8.43, standoff -2.49, extent 29.21,-1.27 31.75,1.27
3D body "PIN_mid.STEP": height 8.43, standoff -2.49, extent 26.67,-1.27 29.21,1.27
3D body "PIN_mid.STEP": height 8.43, standoff -2.49, extent 24.13,-1.27 26.67,1.27
3D body "PIN_mid.STEP": height 8.43, standoff -2.49, extent 21.59,-1.27 24.13,1.27
3D body "PIN_mid.STEP": height 8.43, standoff -2.49, extent 19.05,-1.27 21.59,1.27
3D body "PIN_mid.STEP": height 8.43, standoff -2.49, extent 16.51,-1.27 19.05,1.27
3D body "PIN_mid.STEP": height 8.43, standoff -2.49, extent 13.97,-1.27 16.51,1.27
3D body "PIN_mid.STEP": height 8.43, standoff -2.49, extent 11.43,-1.27 13.97,1.27
3D body "PIN_mid.STEP": height 8.43, standoff -2.49, extent 8.89,-1.27 11.43,1.27
3D body "PIN_mid.STEP": height 8.43, standoff -2.49, extent 6.35,-1.27 8.89,1.27
3D body "PIN_mid.STEP": height 8.43, standoff -2.49, extent 3.81,-1.27 6.35,1.27
3D body "PIN_mid.STEP": height 8.43, standoff -2.49, extent 1.27,-1.27 3.81,1.27
3D body "PIN.STEP": height 8.43, standoff -2.49, extent -1.27,-1.27 1.27,1.27

## MHDR1X14-254P [mm] "Male Header 1X14 with 2.54 mm Pitch"
height 8.4
pads (14):
  rect 1.5x1.5 hole 0.9: 1(0,0)
  round 1.5 hole 0.9: 2(2.54,0) 3(5.08,0) 4(7.62,0) 5(10.16,0) 6(12.7,0) 7(15.24,0) 8(17.78,0) 9(20.32,0) 10(22.86,0) 11(25.4,0) 12(27.94,0) 13(30.48,0) 14(33.02,0)
Top Overlay:
  lines w0.254: 1.27,-0.762 1.777,-1.268 3.302,-1.268 3.81,-0.76 3.81,0.762 3.301,1.272 1.778,1.272 1.27,0.764 ; 3.81,-0.762 4.317,-1.268 5.842,-1.268 6.35,-0.76 6.35,0.762 5.841,1.272 4.318,1.272 3.81,0.764 ; 6.35,-0.762 6.857,-1.268 8.382,-1.268 8.89,-0.76 8.89,0.762 8.381,1.272 6.858,1.272 6.35,0.764 ; 8.89,-0.762 9.397,-1.268 10.922,-1.268 11.43,-0.76 11.43,0.762 10.921,1.272 9.398,1.272 8.89,0.764 ; 11.43,-0.762 11.937,-1.268 13.462,-1.268 13.97,-0.76 13.97,0.762 13.461,1.272 11.938,1.272 11.43,0.764 ; 13.97,-0.762 14.477,-1.268 16.002,-1.268 16.51,-0.76 16.51,0.762 16.001,1.272 14.478,1.272 13.97,0.764 ; 16.51,-0.762 17.017,-1.268 18.542,-1.268 19.05,-0.76 19.05,0.762 18.541,1.272 17.018,1.272 16.51,0.764 ; 19.05,-0.762 19.557,-1.268 21.082,-1.268 21.59,-0.76 21.59,0.762 21.081,1.272 19.558,1.272 19.05,0.764 ; 21.59,-0.762 22.097,-1.268 23.622,-1.268 24.13,-0.76 24.13,0.762 23.621,1.272 22.098,1.272 21.59,0.764 ; 24.13,-0.762 24.637,-1.268 26.162,-1.268 26.67,-0.76 26.67,0.762 26.161,1.272 24.638,1.272 24.13,0.764 ; 26.67,-0.762 27.177,-1.268 28.702,-1.268 29.21,-0.76 29.21,0.762 28.701,1.272 27.178,1.272 26.67,0.764 ; 29.21,-0.762 29.717,-1.268 31.242,-1.268 31.75,-0.76 31.75,0.762 31.241,1.272 29.718,1.272 29.21,0.764 ; 31.75,-0.762 32.257,-1.268 33.782,-1.268 34.29,-0.76 34.29,0.762 33.781,1.272 32.258,1.272 31.75,0.764 ; -1.27,-0.762 -0.763,-1.268 0.762,-1.268 1.27,-0.76 1.27,0.762 0.761,1.272 -0.762,1.272 -1.27,0.764 -1.27,-0.762
  text "14" at 33.528,-3.145 h1
  text "13" at 30.988,-3.097 h1
  text "12" at 28.448,-3.097 h1
  text "11" at 25.908,-2.669 h1
  text "10" at 23.368,-3.097 h1
  text "9" at 20.828,-2.317 h1
  text "8" at 18.288,-2.364 h1
  text "7" at 15.748,-2.364 h1
  text "6" at 13.208,-2.317 h1
  text "5" at 10.668,-2.364 h1
  text "4" at 8.128,-2.412 h1
  text "3" at 5.588,-2.364 h1
  text "2" at 3.048,-2.364 h1
  text "1" at 0.508,-1.936 h1
  text "1" at 0.508,-1.936 h1
3D body "PIN.STEP": height 8.43, standoff -2.49, extent 31.75,-1.27 34.29,1.27
3D body "PIN_mid.STEP": height 8.43, standoff -2.49, extent 29.21,-1.27 31.75,1.27
3D body "PIN_mid.STEP": height 8.43, standoff -2.49, extent 26.67,-1.27 29.21,1.27
3D body "PIN_mid.STEP": height 8.43, standoff -2.49, extent 24.13,-1.27 26.67,1.27
3D body "PIN_mid.STEP": height 8.43, standoff -2.49, extent 21.59,-1.27 24.13,1.27
3D body "PIN_mid.STEP": height 8.43, standoff -2.49, extent 19.05,-1.27 21.59,1.27
3D body "PIN_mid.STEP": height 8.43, standoff -2.49, extent 16.51,-1.27 19.05,1.27
3D body "PIN_mid.STEP": height 8.43, standoff -2.49, extent 13.97,-1.27 16.51,1.27
3D body "PIN_mid.STEP": height 8.43, standoff -2.49, extent 11.43,-1.27 13.97,1.27
3D body "PIN_mid.STEP": height 8.43, standoff -2.49, extent 8.89,-1.27 11.43,1.27
3D body "PIN_mid.STEP": height 8.43, standoff -2.49, extent 6.35,-1.27 8.89,1.27
3D body "PIN_mid.STEP": height 8.43, standoff -2.49, extent 3.81,-1.27 6.35,1.27
3D body "PIN_mid.STEP": height 8.43, standoff -2.49, extent 1.27,-1.27 3.81,1.27
3D body "PIN.STEP": height 8.43, standoff -2.49, extent -1.27,-1.27 1.27,1.27

## MHDR1X14-254P - E [mm] "Male Header 1X14 with 2.54 mm Pitch"
height 8.4
pads (14):
  rect 1.5x1.5 hole 0.9: 1(0,0)
  round 1.5 hole 0.9: 2(2.54,0) 3(5.08,0) 4(7.62,0) 5(10.16,0) 6(12.7,0) 7(15.24,0) 8(17.78,0) 9(20.32,0) 10(22.86,0) 11(25.4,0) 12(27.94,0) 13(30.48,0) 14(33.02,0)
Top Overlay:
  lines w0.254: 1.27,-0.762 1.777,-1.268 3.302,-1.268 3.81,-0.76 3.81,0.762 3.301,1.272 1.778,1.272 1.27,0.764 ; 3.81,-0.762 4.317,-1.268 5.842,-1.268 6.35,-0.76 6.35,0.762 5.841,1.272 4.318,1.272 3.81,0.764 ; 6.35,-0.762 6.857,-1.268 8.382,-1.268 8.89,-0.76 8.89,0.762 8.381,1.272 6.858,1.272 6.35,0.764 ; 8.89,-0.762 9.397,-1.268 10.922,-1.268 11.43,-0.76 11.43,0.762 10.921,1.272 9.398,1.272 8.89,0.764 ; 11.43,-0.762 11.937,-1.268 13.462,-1.268 13.97,-0.76 13.97,0.762 13.461,1.272 11.938,1.272 11.43,0.764 ; 13.97,-0.762 14.477,-1.268 16.002,-1.268 16.51,-0.76 16.51,0.762 16.001,1.272 14.478,1.272 13.97,0.764 ; 16.51,-0.762 17.017,-1.268 18.542,-1.268 19.05,-0.76 19.05,0.762 18.541,1.272 17.018,1.272 16.51,0.764 ; 19.05,-0.762 19.557,-1.268 21.082,-1.268 21.59,-0.76 21.59,0.762 21.081,1.272 19.558,1.272 19.05,0.764 ; 21.59,-0.762 22.097,-1.268 23.622,-1.268 24.13,-0.76 24.13,0.762 23.621,1.272 22.098,1.272 21.59,0.764 ; 24.13,-0.762 24.637,-1.268 26.162,-1.268 26.67,-0.76 26.67,0.762 26.161,1.272 24.638,1.272 24.13,0.764 ; 26.67,-0.762 27.177,-1.268 28.702,-1.268 29.21,-0.76 29.21,0.762 28.701,1.272 27.178,1.272 26.67,0.764 ; 29.21,-0.762 29.717,-1.268 31.242,-1.268 31.75,-0.76 31.75,0.762 31.241,1.272 29.718,1.272 29.21,0.764 ; 31.75,-0.762 32.257,-1.268 33.782,-1.268 34.29,-0.76 34.29,0.762 33.781,1.272 32.258,1.272 31.75,0.764 ; -1.27,-0.762 -0.763,-1.268 0.762,-1.268 1.27,-0.76 1.27,0.762 0.761,1.272 -0.762,1.272 -1.27,0.764 -1.27,-0.762
3D body "PIN.STEP": height 8.43, standoff -2.49, extent -1.27,-1.27 1.27,1.27
3D body "PIN_mid.STEP": height 8.43, standoff -2.49, extent 1.27,-1.27 3.81,1.27
3D body "PIN_mid.STEP": height 8.43, standoff -2.49, extent 3.81,-1.27 6.35,1.27
3D body "PIN_mid.STEP": height 8.43, standoff -2.49, extent 6.35,-1.27 8.89,1.27
3D body "PIN_mid.STEP": height 8.43, standoff -2.49, extent 8.89,-1.27 11.43,1.27
3D body "PIN_mid.STEP": height 8.43, standoff -2.49, extent 11.43,-1.27 13.97,1.27
3D body "PIN_mid.STEP": height 8.43, standoff -2.49, extent 13.97,-1.27 16.51,1.27
3D body "PIN_mid.STEP": height 8.43, standoff -2.49, extent 16.51,-1.27 19.05,1.27
3D body "PIN_mid.STEP": height 8.43, standoff -2.49, extent 19.05,-1.27 21.59,1.27
3D body "PIN_mid.STEP": height 8.43, standoff -2.49, extent 21.59,-1.27 24.13,1.27
3D body "PIN_mid.STEP": height 8.43, standoff -2.49, extent 24.13,-1.27 26.67,1.27
3D body "PIN_mid.STEP": height 8.43, standoff -2.49, extent 26.67,-1.27 29.21,1.27
3D body "PIN_mid.STEP": height 8.43, standoff -2.49, extent 29.21,-1.27 31.75,1.27
3D body "PIN.STEP": height 8.43, standoff -2.49, extent 31.75,-1.27 34.29,1.27

## MHDR1X15-254P [mm] "Male Header 1X15 with 2.54 mm Pitch"
height 8.4
pads (15):
  rect 1.5x1.5 hole 0.9: 1(0,0)
  round 1.5 hole 0.9: 2(2.54,0) 3(5.08,0) 4(7.62,0) 5(10.16,0) 6(12.7,0) 7(15.24,0) 8(17.78,0) 9(20.32,0) 10(22.86,0) 11(25.4,0) 12(27.94,0) 13(30.48,0) 14(33.02,0) 15(35.56,0)
Top Overlay:
  lines w0.254: 1.27,-0.762 1.777,-1.268 3.302,-1.268 3.81,-0.76 3.81,0.762 3.301,1.272 1.778,1.272 1.27,0.764 ; 3.81,-0.762 4.317,-1.268 5.842,-1.268 6.35,-0.76 6.35,0.762 5.841,1.272 4.318,1.272 3.81,0.764 ; 6.35,-0.762 6.857,-1.268 8.382,-1.268 8.89,-0.76 8.89,0.762 8.381,1.272 6.858,1.272 6.35,0.764 ; 8.89,-0.762 9.397,-1.268 10.922,-1.268 11.43,-0.76 11.43,0.762 10.921,1.272 9.398,1.272 8.89,0.764 ; 11.43,-0.762 11.937,-1.268 13.462,-1.268 13.97,-0.76 13.97,0.762 13.461,1.272 11.938,1.272 11.43,0.764 ; 13.97,-0.762 14.477,-1.268 16.002,-1.268 16.51,-0.76 16.51,0.762 16.001,1.272 14.478,1.272 13.97,0.764 ; 16.51,-0.762 17.017,-1.268 18.542,-1.268 19.05,-0.76 19.05,0.762 18.541,1.272 17.018,1.272 16.51,0.764 ; 19.05,-0.762 19.557,-1.268 21.082,-1.268 21.59,-0.76 21.59,0.762 21.081,1.272 19.558,1.272 19.05,0.764 ; 21.59,-0.762 22.097,-1.268 23.622,-1.268 24.13,-0.76 24.13,0.762 23.621,1.272 22.098,1.272 21.59,0.764 ; 24.13,-0.762 24.637,-1.268 26.162,-1.268 26.67,-0.76 26.67,0.762 26.161,1.272 24.638,1.272 24.13,0.764 ; 26.67,-0.762 27.177,-1.268 28.702,-1.268 29.21,-0.76 29.21,0.762 28.701,1.272 27.178,1.272 26.67,0.764 ; 29.21,-0.762 29.717,-1.268 31.242,-1.268 31.75,-0.76 31.75,0.762 31.241,1.272 29.718,1.272 29.21,0.764 ; 31.75,-0.762 32.257,-1.268 33.782,-1.268 34.29,-0.76 34.29,0.762 33.781,1.272 32.258,1.272 31.75,0.764 ; 34.29,-0.762 34.797,-1.268 36.322,-1.268 36.83,-0.76 36.83,0.762 36.321,1.272 34.798,1.272 34.29,0.764 ; -1.27,-0.762 -0.763,-1.268 0.762,-1.268 1.27,-0.76 1.27,0.762 0.761,1.272 -0.762,1.272 -1.27,0.764 -1.27,-0.762
  text "1" at 0.508,-1.936 h1
  text "1" at 0.508,-1.936 h1
  text "2" at 3.048,-2.364 h1
  text "3" at 5.588,-2.364 h1
  text "4" at 8.128,-2.412 h1
  text "5" at 10.668,-2.364 h1
  text "6" at 13.208,-2.317 h1
  text "7" at 15.748,-2.364 h1
  text "8" at 18.288,-2.364 h1
  text "9" at 20.828,-2.317 h1
  text "10" at 23.368,-3.097 h1
  text "11" at 25.908,-2.669 h1
  text "12" at 28.448,-3.097 h1
  text "13" at 30.988,-3.097 h1
  text "14" at 33.528,-3.145 h1
  text "15" at 36.068,-3.097 h1
3D body "PIN.STEP": height 8.43, standoff -2.49, extent 34.29,-1.27 36.83,1.27
3D body "PIN_mid.STEP": height 8.43, standoff -2.49, extent 31.75,-1.27 34.29,1.27
3D body "PIN_mid.STEP": height 8.43, standoff -2.49, extent 29.21,-1.27 31.75,1.27
3D body "PIN_mid.STEP": height 8.43, standoff -2.49, extent 26.67,-1.27 29.21,1.27
3D body "PIN_mid.STEP": height 8.43, standoff -2.49, extent 24.13,-1.27 26.67,1.27
3D body "PIN_mid.STEP": height 8.43, standoff -2.49, extent 21.59,-1.27 24.13,1.27
3D body "PIN_mid.STEP": height 8.43, standoff -2.49, extent 19.05,-1.27 21.59,1.27
3D body "PIN_mid.STEP": height 8.43, standoff -2.49, extent 16.51,-1.27 19.05,1.27
3D body "PIN_mid.STEP": height 8.43, standoff -2.49, extent 13.97,-1.27 16.51,1.27
3D body "PIN_mid.STEP": height 8.43, standoff -2.49, extent 11.43,-1.27 13.97,1.27
3D body "PIN_mid.STEP": height 8.43, standoff -2.49, extent 8.89,-1.27 11.43,1.27
3D body "PIN_mid.STEP": height 8.43, standoff -2.49, extent 6.35,-1.27 8.89,1.27
3D body "PIN_mid.STEP": height 8.43, standoff -2.49, extent 3.81,-1.27 6.35,1.27
3D body "PIN_mid.STEP": height 8.43, standoff -2.49, extent 1.27,-1.27 3.81,1.27
3D body "PIN.STEP": height 8.43, standoff -2.49, extent -1.27,-1.27 1.27,1.27

## MHDR1X15-254P - E [mm] "Male Header 1X15 with 2.54 mm Pitch"
height 8.4
pads (15):
  rect 1.5x1.5 hole 0.9: 1(0,0)
  round 1.5 hole 0.9: 2(2.54,0) 3(5.08,0) 4(7.62,0) 5(10.16,0) 6(12.7,0) 7(15.24,0) 8(17.78,0) 9(20.32,0) 10(22.86,0) 11(25.4,0) 12(27.94,0) 13(30.48,0) 14(33.02,0) 15(35.56,0)
Top Overlay:
  lines w0.254: 1.27,-0.762 1.777,-1.268 3.302,-1.268 3.81,-0.76 3.81,0.762 3.301,1.272 1.778,1.272 1.27,0.764 ; 3.81,-0.762 4.317,-1.268 5.842,-1.268 6.35,-0.76 6.35,0.762 5.841,1.272 4.318,1.272 3.81,0.764 ; 6.35,-0.762 6.857,-1.268 8.382,-1.268 8.89,-0.76 8.89,0.762 8.381,1.272 6.858,1.272 6.35,0.764 ; 8.89,-0.762 9.397,-1.268 10.922,-1.268 11.43,-0.76 11.43,0.762 10.921,1.272 9.398,1.272 8.89,0.764 ; 11.43,-0.762 11.937,-1.268 13.462,-1.268 13.97,-0.76 13.97,0.762 13.461,1.272 11.938,1.272 11.43,0.764 ; 13.97,-0.762 14.477,-1.268 16.002,-1.268 16.51,-0.76 16.51,0.762 16.001,1.272 14.478,1.272 13.97,0.764 ; 16.51,-0.762 17.017,-1.268 18.542,-1.268 19.05,-0.76 19.05,0.762 18.541,1.272 17.018,1.272 16.51,0.764 ; 19.05,-0.762 19.557,-1.268 21.082,-1.268 21.59,-0.76 21.59,0.762 21.081,1.272 19.558,1.272 19.05,0.764 ; 21.59,-0.762 22.097,-1.268 23.622,-1.268 24.13,-0.76 24.13,0.762 23.621,1.272 22.098,1.272 21.59,0.764 ; 24.13,-0.762 24.637,-1.268 26.162,-1.268 26.67,-0.76 26.67,0.762 26.161,1.272 24.638,1.272 24.13,0.764 ; 26.67,-0.762 27.177,-1.268 28.702,-1.268 29.21,-0.76 29.21,0.762 28.701,1.272 27.178,1.272 26.67,0.764 ; 29.21,-0.762 29.717,-1.268 31.242,-1.268 31.75,-0.76 31.75,0.762 31.241,1.272 29.718,1.272 29.21,0.764 ; 31.75,-0.762 32.257,-1.268 33.782,-1.268 34.29,-0.76 34.29,0.762 33.781,1.272 32.258,1.272 31.75,0.764 ; 34.29,-0.762 34.797,-1.268 36.322,-1.268 36.83,-0.76 36.83,0.762 36.321,1.272 34.798,1.272 34.29,0.764 ; -1.27,-0.762 -0.763,-1.268 0.762,-1.268 1.27,-0.76 1.27,0.762 0.761,1.272 -0.762,1.272 -1.27,0.764 -1.27,-0.762
3D body "PIN.STEP": height 8.43, standoff -2.49, extent 34.29,-1.27 36.83,1.27
3D body "PIN_mid.STEP": height 8.43, standoff -2.49, extent 31.75,-1.27 34.29,1.27
3D body "PIN_mid.STEP": height 8.43, standoff -2.49, extent 29.21,-1.27 31.75,1.27
3D body "PIN_mid.STEP": height 8.43, standoff -2.49, extent 26.67,-1.27 29.21,1.27
3D body "PIN_mid.STEP": height 8.43, standoff -2.49, extent 24.13,-1.27 26.67,1.27
3D body "PIN_mid.STEP": height 8.43, standoff -2.49, extent 21.59,-1.27 24.13,1.27
3D body "PIN_mid.STEP": height 8.43, standoff -2.49, extent 19.05,-1.27 21.59,1.27
3D body "PIN_mid.STEP": height 8.43, standoff -2.49, extent 16.51,-1.27 19.05,1.27
3D body "PIN_mid.STEP": height 8.43, standoff -2.49, extent 13.97,-1.27 16.51,1.27
3D body "PIN_mid.STEP": height 8.43, standoff -2.49, extent 11.43,-1.27 13.97,1.27
3D body "PIN_mid.STEP": height 8.43, standoff -2.49, extent 8.89,-1.27 11.43,1.27
3D body "PIN_mid.STEP": height 8.43, standoff -2.49, extent 6.35,-1.27 8.89,1.27
3D body "PIN_mid.STEP": height 8.43, standoff -2.49, extent 3.81,-1.27 6.35,1.27
3D body "PIN_mid.STEP": height 8.43, standoff -2.49, extent 1.27,-1.27 3.81,1.27
3D body "PIN.STEP": height 8.43, standoff -2.49, extent -1.27,-1.27 1.27,1.27

## MHDR1X16-254P [mm] "Male Header 1X16 with 2.54 mm Pitch"
height 8.4
pads (16):
  rect 1.5x1.5 hole 0.9: 1(0,0)
  round 1.5 hole 0.9: 2(2.54,0) 3(5.08,0) 4(7.62,0) 5(10.16,0) 6(12.7,0) 7(15.24,0) 8(17.78,0) 9(20.32,0) 10(22.86,0) 11(25.4,0) 12(27.94,0) 13(30.48,0) 14(33.02,0) 15(35.56,0) 16(38.1,0)
Top Overlay:
  lines w0.254: 1.27,-0.762 1.777,-1.268 3.302,-1.268 3.81,-0.76 3.81,0.762 3.301,1.272 1.778,1.272 1.27,0.764 ; 3.81,-0.762 4.317,-1.268 5.842,-1.268 6.35,-0.76 6.35,0.762 5.841,1.272 4.318,1.272 3.81,0.764 ; 6.35,-0.762 6.857,-1.268 8.382,-1.268 8.89,-0.76 8.89,0.762 8.381,1.272 6.858,1.272 6.35,0.764 ; 8.89,-0.762 9.397,-1.268 10.922,-1.268 11.43,-0.76 11.43,0.762 10.921,1.272 9.398,1.272 8.89,0.764 ; 11.43,-0.762 11.937,-1.268 13.462,-1.268 13.97,-0.76 13.97,0.762 13.461,1.272 11.938,1.272 11.43,0.764 ; 13.97,-0.762 14.477,-1.268 16.002,-1.268 16.51,-0.76 16.51,0.762 16.001,1.272 14.478,1.272 13.97,0.764 ; 16.51,-0.762 17.017,-1.268 18.542,-1.268 19.05,-0.76 19.05,0.762 18.541,1.272 17.018,1.272 16.51,0.764 ; 19.05,-0.762 19.557,-1.268 21.082,-1.268 21.59,-0.76 21.59,0.762 21.081,1.272 19.558,1.272 19.05,0.764 ; 21.59,-0.762 22.097,-1.268 23.622,-1.268 24.13,-0.76 24.13,0.762 23.621,1.272 22.098,1.272 21.59,0.764 ; 24.13,-0.762 24.637,-1.268 26.162,-1.268 26.67,-0.76 26.67,0.762 26.161,1.272 24.638,1.272 24.13,0.764 ; 26.67,-0.762 27.177,-1.268 28.702,-1.268 29.21,-0.76 29.21,0.762 28.701,1.272 27.178,1.272 26.67,0.764 ; 29.21,-0.762 29.717,-1.268 31.242,-1.268 31.75,-0.76 31.75,0.762 31.241,1.272 29.718,1.272 29.21,0.764 ; 31.75,-0.762 32.257,-1.268 33.782,-1.268 34.29,-0.76 34.29,0.762 33.781,1.272 32.258,1.272 31.75,0.764 ; 34.29,-0.762 34.797,-1.268 36.322,-1.268 36.83,-0.76 36.83,0.762 36.321,1.272 34.798,1.272 34.29,0.764 ; 36.83,-0.762 37.337,-1.268 38.862,-1.268 39.37,-0.76 39.37,0.762 38.861,1.272 37.338,1.272 36.83,0.764 ; -1.27,-0.762 -0.763,-1.268 0.762,-1.268 1.27,-0.76 1.27,0.762 0.761,1.272 -0.762,1.272 -1.27,0.764 -1.27,-0.762
  text "1" at 0.508,-1.936 h1
  text "1" at 0.508,-1.936 h1
  text "2" at 3.048,-2.364 h1
  text "3" at 5.588,-2.364 h1
  text "4" at 8.128,-2.412 h1
  text "5" at 10.668,-2.364 h1
  text "6" at 13.208,-2.317 h1
  text "7" at 15.748,-2.364 h1
  text "8" at 18.288,-2.364 h1
  text "9" at 20.828,-2.317 h1
  text "10" at 23.368,-3.097 h1
  text "11" at 25.908,-2.669 h1
  text "12" at 28.448,-3.097 h1
  text "13" at 30.988,-3.097 h1
  text "14" at 33.528,-3.145 h1
  text "15" at 36.068,-3.097 h1
  text "16" at 38.608,-3.05 h1
3D body "PIN.STEP": height 8.43, standoff -2.49, extent 36.83,-1.27 39.37,1.27
3D body "PIN_mid.STEP": height 8.43, standoff -2.49, extent 34.29,-1.27 36.83,1.27
3D body "PIN_mid.STEP": height 8.43, standoff -2.49, extent 31.75,-1.27 34.29,1.27
3D body "PIN_mid.STEP": height 8.43, standoff -2.49, extent 29.21,-1.27 31.75,1.27
3D body "PIN_mid.STEP": height 8.43, standoff -2.49, extent 26.67,-1.27 29.21,1.27
3D body "PIN_mid.STEP": height 8.43, standoff -2.49, extent 24.13,-1.27 26.67,1.27
3D body "PIN_mid.STEP": height 8.43, standoff -2.49, extent 21.59,-1.27 24.13,1.27
3D body "PIN_mid.STEP": height 8.43, standoff -2.49, extent 19.05,-1.27 21.59,1.27
3D body "PIN_mid.STEP": height 8.43, standoff -2.49, extent 16.51,-1.27 19.05,1.27
3D body "PIN_mid.STEP": height 8.43, standoff -2.49, extent 13.97,-1.27 16.51,1.27
3D body "PIN_mid.STEP": height 8.43, standoff -2.49, extent 11.43,-1.27 13.97,1.27
3D body "PIN_mid.STEP": height 8.43, standoff -2.49, extent 8.89,-1.27 11.43,1.27
3D body "PIN_mid.STEP": height 8.43, standoff -2.49, extent 6.35,-1.27 8.89,1.27
3D body "PIN_mid.STEP": height 8.43, standoff -2.49, extent 3.81,-1.27 6.35,1.27
3D body "PIN_mid.STEP": height 8.43, standoff -2.49, extent 1.27,-1.27 3.81,1.27
3D body "PIN.STEP": height 8.43, standoff -2.49, extent -1.27,-1.27 1.27,1.27

## MHDR1X16-254P - E [mm] "Male Header 1X16 with 2.54 mm Pitch"
height 8.4
pads (16):
  rect 1.5x1.5 hole 0.9: 1(0,0)
  round 1.5 hole 0.9: 2(2.54,0) 3(5.08,0) 4(7.62,0) 5(10.16,0) 6(12.7,0) 7(15.24,0) 8(17.78,0) 9(20.32,0) 10(22.86,0) 11(25.4,0) 12(27.94,0) 13(30.48,0) 14(33.02,0) 15(35.56,0) 16(38.1,0)
Top Overlay:
  lines w0.254: 1.27,-0.762 1.777,-1.268 3.302,-1.268 3.81,-0.76 3.81,0.762 3.301,1.272 1.778,1.272 1.27,0.764 ; 3.81,-0.762 4.317,-1.268 5.842,-1.268 6.35,-0.76 6.35,0.762 5.841,1.272 4.318,1.272 3.81,0.764 ; 6.35,-0.762 6.857,-1.268 8.382,-1.268 8.89,-0.76 8.89,0.762 8.381,1.272 6.858,1.272 6.35,0.764 ; 8.89,-0.762 9.397,-1.268 10.922,-1.268 11.43,-0.76 11.43,0.762 10.921,1.272 9.398,1.272 8.89,0.764 ; 11.43,-0.762 11.937,-1.268 13.462,-1.268 13.97,-0.76 13.97,0.762 13.461,1.272 11.938,1.272 11.43,0.764 ; 13.97,-0.762 14.477,-1.268 16.002,-1.268 16.51,-0.76 16.51,0.762 16.001,1.272 14.478,1.272 13.97,0.764 ; 16.51,-0.762 17.017,-1.268 18.542,-1.268 19.05,-0.76 19.05,0.762 18.541,1.272 17.018,1.272 16.51,0.764 ; 19.05,-0.762 19.557,-1.268 21.082,-1.268 21.59,-0.76 21.59,0.762 21.081,1.272 19.558,1.272 19.05,0.764 ; 21.59,-0.762 22.097,-1.268 23.622,-1.268 24.13,-0.76 24.13,0.762 23.621,1.272 22.098,1.272 21.59,0.764 ; 24.13,-0.762 24.637,-1.268 26.162,-1.268 26.67,-0.76 26.67,0.762 26.161,1.272 24.638,1.272 24.13,0.764 ; 26.67,-0.762 27.177,-1.268 28.702,-1.268 29.21,-0.76 29.21,0.762 28.701,1.272 27.178,1.272 26.67,0.764 ; 29.21,-0.762 29.717,-1.268 31.242,-1.268 31.75,-0.76 31.75,0.762 31.241,1.272 29.718,1.272 29.21,0.764 ; 31.75,-0.762 32.257,-1.268 33.782,-1.268 34.29,-0.76 34.29,0.762 33.781,1.272 32.258,1.272 31.75,0.764 ; 34.29,-0.762 34.797,-1.268 36.322,-1.268 36.83,-0.76 36.83,0.762 36.321,1.272 34.798,1.272 34.29,0.764 ; 36.83,-0.762 37.337,-1.268 38.862,-1.268 39.37,-0.76 39.37,0.762 38.861,1.272 37.338,1.272 36.83,0.764 ; -1.27,-0.762 -0.763,-1.268 0.762,-1.268 1.27,-0.76 1.27,0.762 0.761,1.272 -0.762,1.272 -1.27,0.764 -1.27,-0.762
3D body "PIN.STEP": height 8.43, standoff -2.49, extent -1.27,-1.27 1.27,1.27
3D body "PIN_mid.STEP": height 8.43, standoff -2.49, extent 1.27,-1.27 3.81,1.27
3D body "PIN_mid.STEP": height 8.43, standoff -2.49, extent 3.81,-1.27 6.35,1.27
3D body "PIN_mid.STEP": height 8.43, standoff -2.49, extent 6.35,-1.27 8.89,1.27
3D body "PIN_mid.STEP": height 8.43, standoff -2.49, extent 8.89,-1.27 11.43,1.27
3D body "PIN_mid.STEP": height 8.43, standoff -2.49, extent 11.43,-1.27 13.97,1.27
3D body "PIN_mid.STEP": height 8.43, standoff -2.49, extent 13.97,-1.27 16.51,1.27
3D body "PIN_mid.STEP": height 8.43, standoff -2.49, extent 16.51,-1.27 19.05,1.27
3D body "PIN_mid.STEP": height 8.43, standoff -2.49, extent 19.05,-1.27 21.59,1.27
3D body "PIN_mid.STEP": height 8.43, standoff -2.49, extent 21.59,-1.27 24.13,1.27
3D body "PIN_mid.STEP": height 8.43, standoff -2.49, extent 24.13,-1.27 26.67,1.27
3D body "PIN_mid.STEP": height 8.43, standoff -2.49, extent 26.67,-1.27 29.21,1.27
3D body "PIN_mid.STEP": height 8.43, standoff -2.49, extent 29.21,-1.27 31.75,1.27
3D body "PIN_mid.STEP": height 8.43, standoff -2.49, extent 31.75,-1.27 34.29,1.27
3D body "PIN_mid.STEP": height 8.43, standoff -2.49, extent 34.29,-1.27 36.83,1.27
3D body "PIN.STEP": height 8.43, standoff -2.49, extent 36.83,-1.27 39.37,1.27